# Altium schematic symbol library TLP175ATPL,E.SchLib: 1 symbol
Pins are listed as number, name and electrical type; pins without a type are passive.

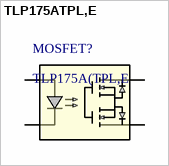
[diagram p0: symbol TLP175ATPL,E]

## TLP175ATPL,E
designator MOSFET?, comment TLP175A(TPL,E
1a, 60 V/0.1 A Photorelay, 3750 Vrms, 4pin SO6; Manufacturer_Name: Toshiba Electronic Devices & Storage Corp.; Copyright: Copyright (C) 2025 Ultra Librarian. All rights reserved.; Manufacturer_Part_Number: TLP175A(TPL,E; RefDes: RefDes; Type: Type
footprint 4pin SO6TLP17XX_TOS
pins: 1 Anode, 3 Cathode, 4 Drain, 6 Drain